# Altium schematic symbol library MTS-103.SchLib: 1 symbol
Pins are listed as number, name and electrical type; pins without a type are passive.

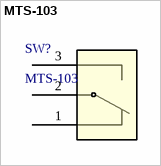
[diagram p0: symbol MTS-103]

## MTS-103
designator SW?
Description; Manufacturer_Name: Jameco Valuepro; Type: Toggle Switches; Copyright: Copyright (C) 2026 Ultra Librarian. All rights reserved.; Manufacturer_Part_Number: MTS-103; RefDes: RefDes
footprint MTS-103_JCV
pins: 1, 2, 3